# Altium footprint library Cole_.PcbLib: 175 footprints (part 11 of 11)
Each footprint in its own frame and in the unit in brackets; x right, y up, seen from the top. Pads: shape width x height; smd on the part's side, far side on the other; paste and mask are expansions set on the pad; w line width, h text height; cw(c..) or ccw(c..) is an arc to the next point about the centre after c.
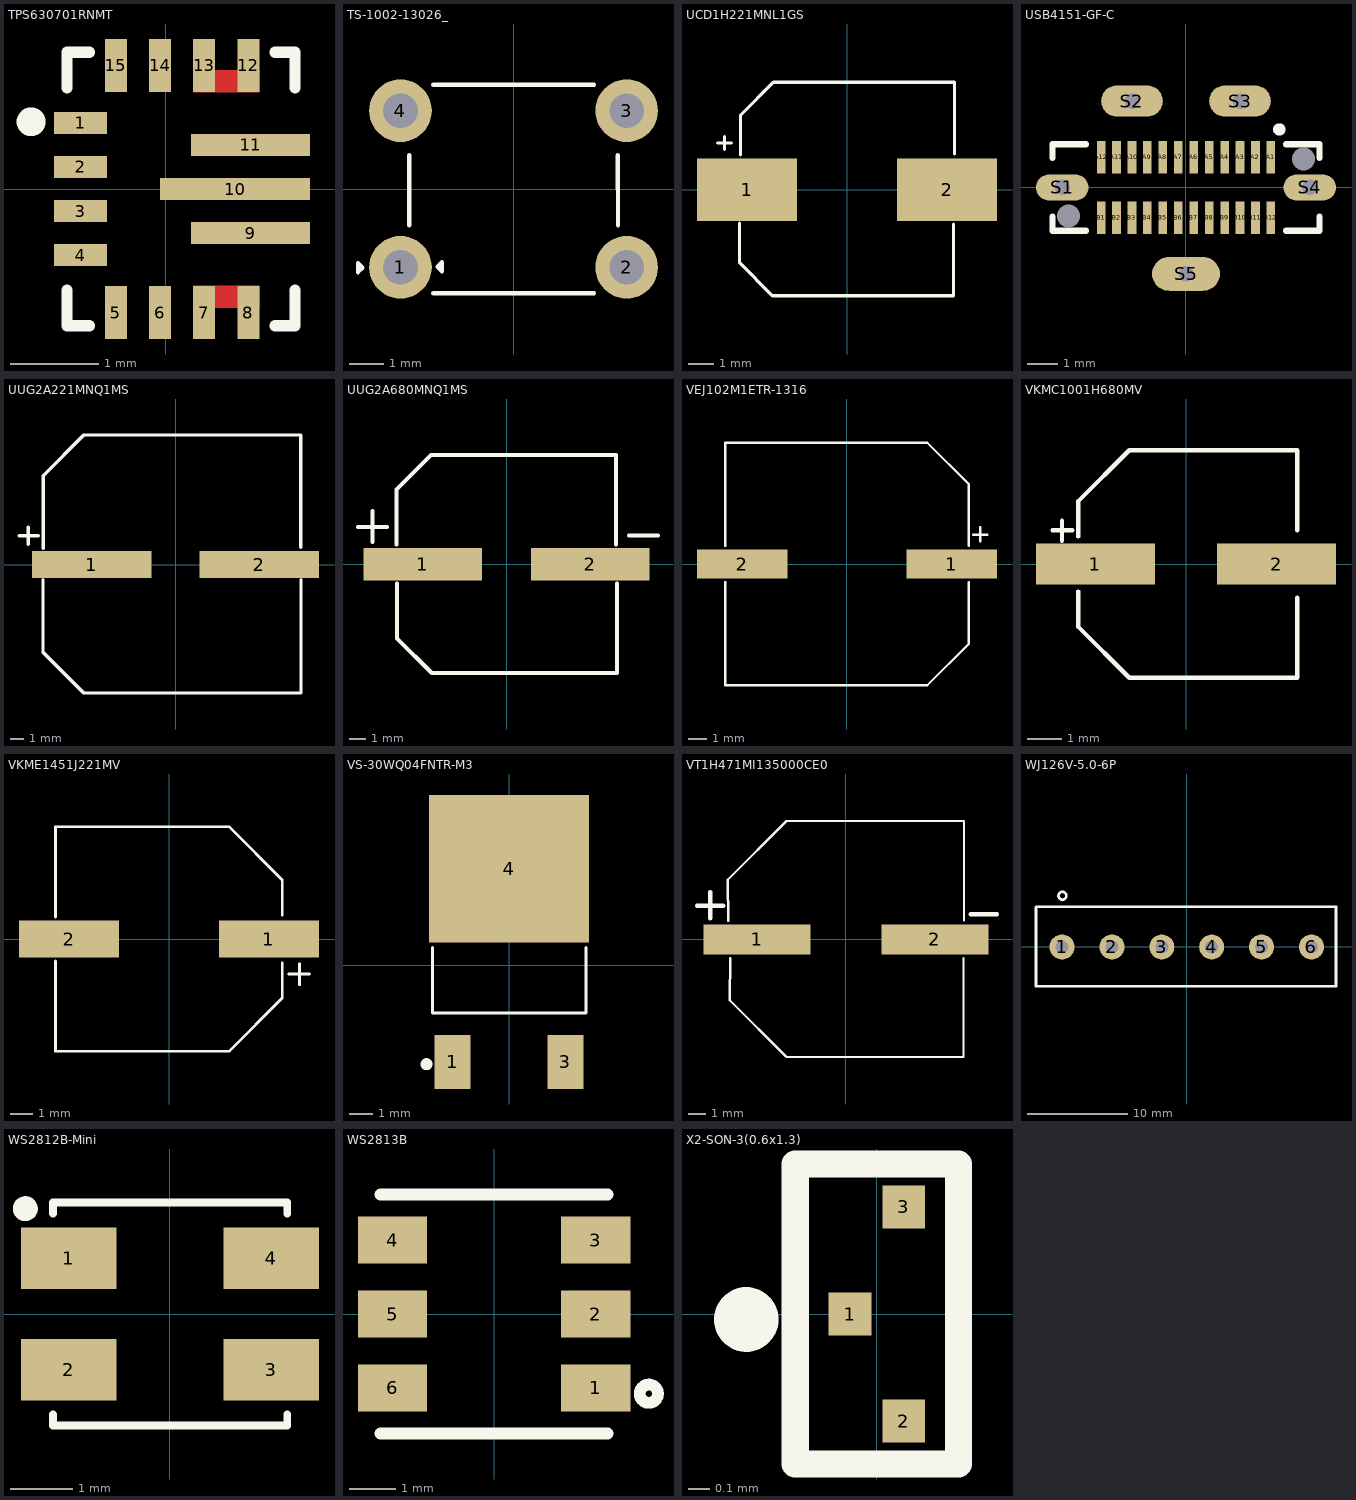
[diagram p10: the footprints below, top view; thin cyan lines are the x and y axes]

## TPS630701RNMT [mm]
pads (15):
  rect 0.6x0.25 smd: 1(-0.962,0.75) 2(-0.962,0.25) 3(-0.962,-0.25) 4(-0.962,-0.75)
  rect 0.25x0.6 smd: 5(-0.562,-1.4) 6(-0.062,-1.4) 7(0.437,-1.4) 8(0.937,-1.4) 12(0.937,1.4) 13(0.437,1.4) 14(-0.062,1.4) 15(-0.562,1.4)
  rect 1.35x0.25 smd: 9(0.962,-0.5) 11(0.962,0.5)
  rect 1.7x0.25 smd: 10(0.787,0)
Top Layer:
  rectangle: 0.317,1.096 1.067,1.346
  rectangle: 0.317,-1.346 1.067,-1.096
Top Overlay:
  circle w0.254: c-1.524,0.762 r0.036
  lines w0.127: -1.118,-1.143 -1.118,-1.549 -0.864,-1.549 ; -1.118,1.143 -1.118,1.549 -0.864,1.549 ; 1.239,-1.549 1.467,-1.549 1.467,-1.143 ; 1.239,1.549 1.467,1.549 1.467,1.143
3D body "TPS630701RNMT.STEP": height 1, standoff 0, extent -1.072,-1.5 1.428,1.5

## TS-1002-13026_ [mm]
pads (4):
  round 1.8 hole 1: 1(-3.25,-2.25) 2(3.25,-2.25) 3(3.25,2.25) 4(-3.25,2.25)
Top Overlay:
  lines w0.127: -3,-1.041 -2.997,0.965 ; -2.311,-3 0,-3 2.311,-3 ; -2.311,3 0,3 2.311,3 ; 2.997,0.965 3,-1.041 ; -4.47,-2.388 -4.343,-2.261 -4.47,-2.134 -4.47,-2.388 ; -2.184,-2.235 -2.057,-2.108 -2.057,-2.362 -2.184,-2.235
3D body "XUNPU TS-1002-13026.STEP": height 19.98, standoff -3.2, extent -4.242,-2.997 4.13,2.997

## UCD1H221MNL1GS [mm] "CAP ALUM 220UF 20% 50V SMD"
pads (2):
  rect 4x2.5 smd: 1(-4,0) 2(4,0)
Top Overlay:
  lines w0.127: -5.184,1.866 -4.63,1.866 ; -4.902,1.618 -4.902,2.121 ; -4.297,-1.346 -4.297,-2.93 -2.985,-4.242 4.255,-4.242 4.255,-1.372 ; -4.258,1.397 -4.258,2.981 -2.946,4.293 4.294,4.293 4.294,1.422
3D body "PCAP_8x10-ELECT_NCA.step": height 10.34, standoff 0, extent -4.673,-4.229 4.623,4.28

## USB4151-GF-C [mm]
pads (31):
  rect 0.28x1.05 smd: A1(2.75,0.975) A2(2.25,0.975) A3(1.75,0.975) A4(1.25,0.975) A5(0.75,0.975) A6(0.25,0.975) A7(-0.25,0.975) A8(-0.75,0.975) A9(-1.25,0.975) A10(-1.75,0.975) A11(-2.25,0.975) A12(-2.75,0.975) B1(-2.75,-0.975) B2(-2.25,-0.975) B3(-1.75,-0.975) B4(-1.25,-0.975) B5(-0.75,-0.975) B6(-0.25,-0.975) B7(0.25,-0.975) B8(0.75,-0.975) B9(1.25,-0.975) B10(1.75,-0.975) B11(2.25,-0.975) B12(2.75,-0.975)
  oval 1.7x0.85 hole 0.5 square: S1(-4.01,0) S4(4.01,0)
  oval 2x1 hole 0.5 square: S2(-1.75,2.8) S3(1.75,2.8)
  oval 2.2x1.1 hole 0.5 square: S5(0,-2.8)
  round 0 hole 0.75 unplated: ""(-3.81,-0.93) ""(3.81,0.92)
Top Overlay:
  circle w0.2: c3.023,1.88 r0.1
  lines w0.2: -4.33,-0.95 -4.33,-1.4 -3.24,-1.4 ; -4.33,0.95 -4.33,1.4 -3.24,1.4 ; 3.24,-1.4 4.33,-1.4 4.33,-0.95 ; 3.24,1.4 4.33,1.4 4.33,0.95
3D body "USB4151-GF-C--3DModel-STEP-56544.STEP": height 11.1, standoff -1.25, extent -4.33,-2.875 4.33,2.875

## UUG2A221MNQ1MS [mm] "CAP ALUM 220UF 20% 100V SMD"
pads (2):
  rect 8.9x2 smd: 1(-6.25,0) 2(6.25,0)
Top Overlay:
  lines w0.254: -11.672,2.159 -10.224,2.159 ; -10.986,1.499 -10.986,2.794 ; -9.883,-1.127 -9.883,-6.475 -9.883,-6.539 -6.846,-9.576 9.359,-9.576 9.359,-1.143 ; -9.868,1.219 -9.868,6.631 -6.83,9.668 9.334,9.668 9.334,1.295
3D body "CAP_UCD_18X16P5_NCH.step": height 17.55, standoff 0, extent -9.754,-9.55 9.754,9.55

## UUG2A680MNQ1MS [mm] "CAP ALUM 68UF 20% 100V SMD"
pads (2):
  rect 7.3x2 smd: 1(-5.15,0) 2(5.15,0)
Top Overlay:
  lines w0.254: -9.144,2.286 -7.366,2.286 ; -8.255,1.372 -8.255,3.277 ; -6.782,1.219 -6.782,4.597 -4.648,6.731 6.743,6.731 6.743,1.219 ; -6.737,-1.194 -6.737,-4.572 -4.603,-6.706 6.788,-6.706 6.788,-1.194 ; 7.544,1.778 9.322,1.778
3D body "CAP_UCD_12P5X13P5_NCH.step": height 14.56, standoff 0, extent -6.998,-6.819 6.998,6.769

## VEJ102M1ETR-1316 [mm]
pads (2):
  rect 5x1.6 smd: 1(5.8,0) 2(-5.8,0)
Top Overlay:
  lines w0.127: -6.731,-0.991 -6.731,-6.706 4.445,-6.706 6.731,-4.42 6.731,-0.991 ; -6.731,0.991 -6.731,6.706 4.445,6.706 6.731,4.42 6.731,0.991 ; 6.985,1.626 7.772,1.626 ; 7.366,1.245 7.366,2.032
3D body "Part1.STEP": height 16.26, standoff -0.04, extent -6.85,-6.5 6.85,6.5

## VKMC1001H680MV [mm] "68uF ±20% 50V 6.3mm 10mm 390mA"
pads (2):
  rect 3.5x1.2 smd: 1(-2.67,0) 2(2.67,0)
Top Overlay:
  lines w0.127: -3.934,0.991 -3.35,0.991 ; -3.655,0.686 -3.655,1.27 ; -3.172,-0.813 -3.172,-1.854 -1.673,-3.353 3.28,-3.353 3.28,-0.991 ; -3.172,0.813 -3.172,1.854 -1.673,3.353 3.28,3.353 3.28,0.991
3D body "User Library-CEL63D66S85H.step": height 8.27, standoff -0.03, extent -3.5,-3.3 3.5,3.3

## VKME1451J221MV [mm] "220uF ±20% 63V 10mm 14.5mm 1.2A 100kHz 10000hrs 105? -55?~+105? SMD,10x14.5mm Aluminum Electrolytic Capacitors - SMD RoHS"
pads (2):
  rect 4.5x1.65 smd: 1(4.5,0) 2(-4.5,0)
Top Overlay:
  lines w0.127: -5.112,-0.991 -5.112,-5.055 2.695,-5.055 5.094,-2.655 5.094,-1.067 ; -5.112,0.991 -5.112,5.055 2.695,5.055 5.094,2.655 5.094,1.067 ; 5.385,-1.575 6.325,-1.575 ; 5.87,-2.057 5.87,-1.118
3D body "vkme1451j221mv.stp": height 13.99, standoff -0.01, extent -5.85,-5.15 5.85,5.15

## VS-30WQ04FNTR-M3 [mm] "DIODE SCHOTTKY DPAK"
pads (3):
  rect 1.524x2.28 smd paste+0: 1(-2.38,-4.072) 3(2.38,-4.072)
  rect 6.74x6.23 smd paste+0: 4(0,4.073)
Top Overlay:
  circle w0.254: c-3.48,-4.166 r0.127
  lines w0.127: -3.226,0.762 -3.226,-2.005 3.249,-2.005 3.249,0.762
3D body "User Library-TO252AA.step": height 2.32, standoff 0.01, extent -3.278,-4.571 3.302,5.129

## VT1H471MI135000CE0 [mm] "470uF ±20% 50V 12.5mm 13.5mm 1000hrs 105? -40?~+105? SMD,12.5x13.5mm Aluminum Electrolytic Capacitors - SMD RoHS"
pads (2):
  rect 6.2x1.75 smd: 1(-5.145,0) 2(5.145,0)
Top Overlay:
  lines w0.127: -6.818,1.067 -6.848,3.459 -3.449,6.858 6.833,6.858 6.833,1.092 ; -6.697,-1.092 -6.728,-3.528 -3.449,-6.807 6.797,-6.807 6.797,-1.067
  lines w0.254: -8.625,1.956 -7.101,1.956 ; -7.863,1.219 -7.863,2.743 ; 7.219,1.448 8.743,1.448
3D body "EEVTG1V471UQ.stp": height 14, standoff 0, extent -7.5,-6.85 7.5,6.85

## WJ126V-5.0-6P [mm] "P=5.0mm Screw terminal RoHS"
pads (6):
  round 2.5 hole 1.3: 1(-12.5,0) 2(-7.5,0) 3(-2.5,0) 4(2.5,0) 5(7.5,0) 6(12.5,0)
Top Overlay:
  circle w0.254: c-12.471,5.131 r0.394
  lines w0.254: -15.113,3.962 -15.113,-3.937 14.961,-3.937 14.961,4.013 -15.062,4.013
3D body "Screw Terminal Block 5mm 6-way.step": height 10, standoff -2, extent -15.15,-4 15,4

## WS2812B-Mini [mm] "SMD,3.5x3.5mm Light Emitting Diodes (LED) RoHS"
pads (4):
  rect 1.545x1 smd: 1(-1.638,0.9) 2(-1.638,-0.9) 3(1.638,-0.9) 4(1.638,0.9)
Top Overlay:
  circle w0.2: c-2.337,1.702 r0.102
  lines w0.127: -1.888,-1.626 -1.888,-1.803 1.896,-1.803 1.896,-1.626 ; -1.888,1.626 -1.888,1.803 1.896,1.803 1.896,1.626
3D body "SMD WS2812B Mini.step": height 1.95, standoff 0, extent -1.84,-1.74 1.84,1.74

## WS2813B [mm]
pads (6):
  rect 1.5x1.02 smd: 1(2.2,-1.6) 2(2.2,0) 3(2.2,1.6) 4(-2.2,1.6) 5(-2.2,0) 6(-2.2,-1.6)
Top Overlay:
  circle w0.254: c3.353,-1.727 r0.198
  lines w0.254: -2.464,-2.591 2.464,-2.591 ; -2.464,2.591 2.464,2.591
3D body "led.stp": height 1.5, standoff 0, extent -2.7,-2.5 2.7,2.5

## X2-SON-3(0.6x1.3) [mm]
pads (3):
  rect 0.2x0.2 smd paste+0 mask+0.05: 1(-0.125,0) 2(0.125,-0.5) 3(0.125,0.5)
Top Overlay:
  circle w0.2: c-0.61,-0.025 r0.051
  lines w0.127: 0.381,0.262 0.381,0.7 -0.381,0.7 -0.381,-0.7 0.381,-0.7 0.381,-0.315 0.381,0.315
3D body "3D_PCB1_2024-06-05.step": height 0.4, standoff 0, extent -0.31,-0.65 0.31,0.65